# Altium footprint library Footprint-Lib-PhilsLab.PcbLib: 351 footprints (part 17 of 22)
Each footprint in its own frame and in the unit in brackets; x right, y up, seen from the top. Pads: shape width x height; smd on the part's side, far side on the other; paste and mask are expansions set on the pad; w line width, h text height; cw(c..) or ccw(c..) is an arc to the next point about the centre after c.
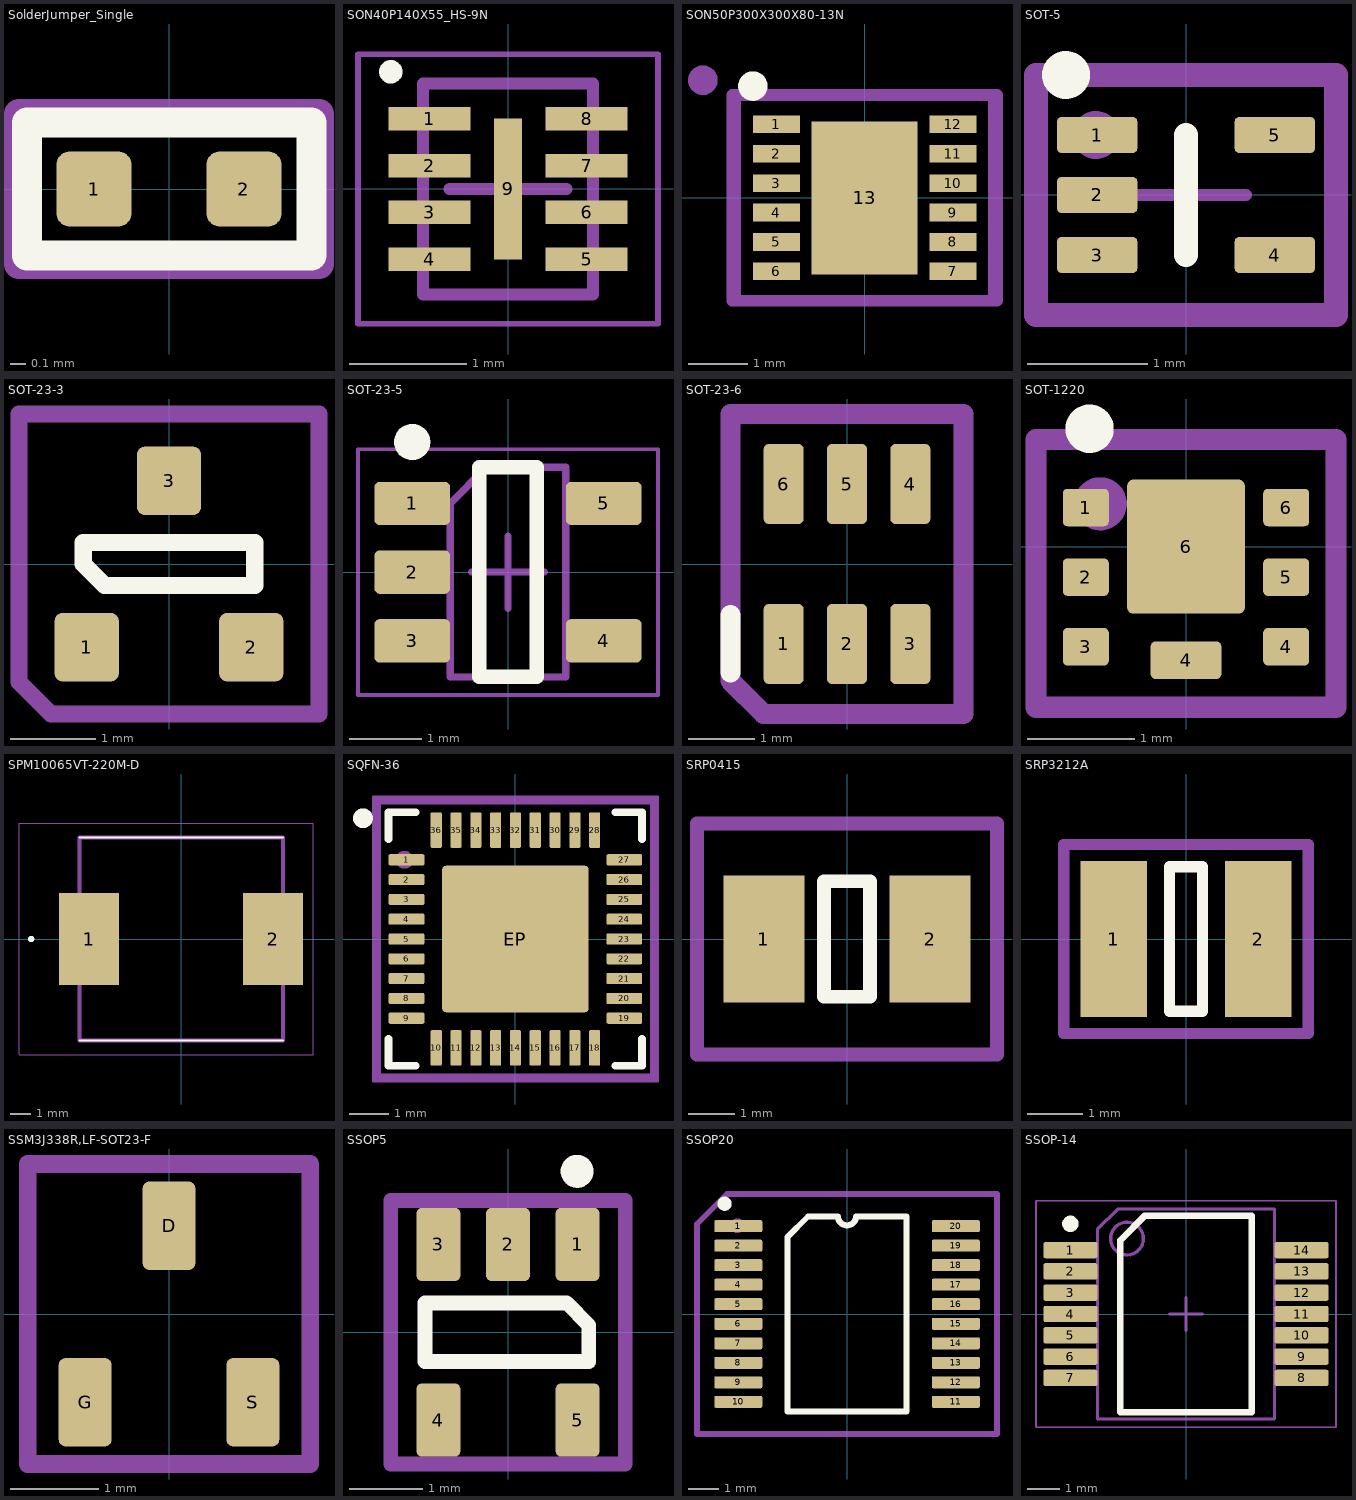
[diagram p16: the footprints below, top view; thin cyan lines are the x and y axes]

## SolderJumper_Single [mm]
pads (2):
  rrect35% 0.5x0.5 smd mask+0: 1(-0.5,0) 2(0.5,0)
Top Overlay:
  lines w0.2: -0.948,-0.444 0.95,-0.444 0.95,0.444 -0.948,0.444 -0.948,0.048 -0.948,-0.444
Top Solder:
  region: -0.5,0.25 0.5,0.25 0.5,-0.25 -0.5,-0.25
Mechanical 13:
  lines w0.2: -1,-0.5 -1,0.5 1,0.5 1,-0.5 -1,-0.5
  text "'.Designator'" at -5.84,-0.925 h1

## SON40P140X55_HS-9N [mm] "SON, 8-Leads, Body 1,70x1,35mm, Pitch 0,40mm, Thermal Pad 1,20x0,24mm, IPC Medium Density"
height 0.55
pads (9):
  rect 0.7x0.2 smd mask+0.05: 1(-0.67,0.6) 2(-0.67,0.2) 3(-0.67,-0.2) 4(-0.67,-0.6) 5(0.67,-0.6) 6(0.67,-0.2) 7(0.67,0.2) 8(0.67,0.6)
  rect 0.24x1.2 smd mask+0.05: 9(0,0)
Top Overlay:
  circle w0.1: c-1,1 r0.05
Mechanical 13:
  lines w0.1: -0.725,-0.9 -0.725,0.9 0.725,0.9 0.725,-0.9 -0.725,-0.9
  text "'.Designator'" at -5.84,-0.925 h1
Mechanical 15:
  lines w0.05: -1.28,-1.15 -1.28,1.15 1.28,1.15 1.28,-1.15 -1.28,-1.15
  lines w0.1: -0.5,0 0.5,0 ; 0,-0.5 0,0.5
3D body "SON40P140X55_HS-9N.step": height 0.55, standoff 0, extent -0.726,-0.9 0.726,0.9

## SON50P300X300X80-13N [mm]
pads (13):
  rect 0.8x0.3 smd: 1(-1.5,1.25) 2(-1.5,0.75) 3(-1.5,0.25) 4(-1.5,-0.25) 5(-1.5,-0.75) 6(-1.5,-1.25) 7(1.5,-1.25) 8(1.5,-0.75) 9(1.5,-0.25) 10(1.5,0.25) 11(1.5,0.75) 12(1.5,1.25)
  rect 1.8x2.6 smd: 13(0,0)
Top Overlay:
  circle w0.25: c-1.9,1.9 r0.125
Mechanical 13:
  circle w0.3: c-2.75,2 r0.1
  lines w0.2: -2.25,-1.75 -2.25,1.75 2.25,1.75 2.25,-1.75 -2.25,-1.75
  text "'.Designator'" at -5.815,-0.9 h1
Mechanical 15:
  lines w0.05: -2.125,-1.8 -2.125,1.8 2.125,1.8 2.125,-1.8 -2.125,-1.8
3D body "MAX17577ATC+.stp": height 0.8, standoff 0, extent -1.55,-1.5 1.55,1.5

## SOT-5 [mm] "SOT, 5-Leads, Body 1.60x1.60mm, Pitch 0.50mm, IPC Medium Density"
height 0.6
pads (5):
  rrect25% 0.67x0.3 smd mask+0.05: 1(-0.74,0.5) 2(-0.74,0) 3(-0.74,-0.5) 4(0.74,-0.5) 5(0.74,0.5)
Top Overlay:
  circle w0.2: c-1,1 r0.1
  lines w0.2: 0,-0.5 0,0.5
Mechanical 13:
  circle w0.2: c-0.75,0.5 r0.1
  lines w0.2: -1.25,-1 -1.25,1 1.25,1 1.25,-1 -1.25,-1
Mechanical 15:
  lines w0.05: -1.225,-1 -1.225,1 1.225,1 1.225,-1 -1.225,-1
  lines w0.1: -0.5,0 0.5,0 ; 0,-0.5 0,0.5
3D body "SOT-5.step": height 0.6, standoff 0, extent -0.8,-0.848 0.8,0.848

## SOT-23-3 [mm]
pads (3):
  rrect25% 0.75x0.8 smd: 1(-0.96,-0.97) 2(0.96,-0.97) 3(0,0.97)
Top Overlay:
  lines w0.2: -1,0 -0.75,-0.25 1,-0.25 1,0.25 -1,0.25 -1,0
Mechanical 13:
  lines w0.2: -1.75,-1.377 -1.75,1.75 1.75,1.75 1.75,-1.75 -1.377,-1.75 -1.75,-1.377
  text "'.Designator'" at -5.84,-0.925 h1
3D body "SOT-23-3.stp": height 1.01, standoff 0.01, extent -1.45,-1.15 1.45,1.15

## SOT-23-5 [mm] "SOT23, 5-Leads, Body 2,90x2,80mm, Pitch 0,95mm, IPC Medium Density"
height 1.45
pads (5):
  rrect25% 1.05x0.6 smd: 1(-1.325,0.95) 2(-1.325,0) 3(-1.325,-0.95) 4(1.325,-0.95) 5(1.325,0.95)
Top Overlay:
  circle w0.25: c-1.325,1.8 r0.125
  lines w0.2: -0.4,-1.45 -0.4,1.45 0.4,1.45 0.4,-1.45 -0.4,-1.45
Mechanical 13:
  lines w0.1: -0.8,-1.45 0.8,-1.45 0.8,1.45 -0.3,1.45 -0.8,0.95 -0.8,-1.45
Mechanical 15:
  lines w0.05: -2.075,-1.7 2.075,-1.7 2.075,1.7 -2.075,1.7 -2.075,-1.7
  lines w0.1: -0.5,0 0.5,0 ; 0,-0.5 0,0.5
3D body "SOT95P280X145-5N.step": height 1.45, standoff 0, extent -1.4,-1.45 1.4,1.45

## SOT-23-6 [mm]
pads (6):
  rrect25% 0.6x1.2 smd: 1(-0.95,-1.2) 2(0,-1.2) 3(0.95,-1.2) 4(0.95,1.2) 5(0,1.2) 6(-0.95,1.2)
Top Overlay:
  lines w0.3: -1.75,-1.628 -1.75,-0.761
Mechanical 13:
  lines w0.3: -1.75,-1.75 -1.75,0 -1.75,2.25 1.75,2.25 1.75,-2.25 -1.25,-2.25 -1.75,-1.75
  text "'.Designator'" at -5.84,-0.925 h1
3D body "SOT23-6.step": height 1.45, standoff 0, extent -1.45,-1.4 1.45,1.4

## SOT-1220 [mm]
pads (8):
  rrect25% 0.43x0.35 smd mask+0.05: 1(-0.935,0.365) 2(-0.935,-0.285) 3(-0.935,-0.935) 4(0.935,-0.935) 5(0.935,-0.285) 6(0.935,0.365)
  rrect25% 0.66x0.35 smd mask+0.12: 4(0,-1.06)
  rrect10% 1.1x1.25 smd mask+0.18: 6(0,0)
Top Overlay:
  circle w0.3: c-0.9,1.1 r0.075
Mechanical 13:
  circle w0.3: c-0.8,0.4 r0.097
  lines w0.2: -1.4,-1.5 -1.4,1 1.4,1 1.4,-1.5 -1.4,-1.5
  text ".Designator" at -4.998,-0.333 h1
3D body "SOT-1220-UDFN6B.STEP": height 0.61, standoff 0.01, extent -1,-1.287 1,0.713

## SPM10065VT-220M-D [mm]
pads (2):
  rect 2.95x4.5 smd: 1(-4.525,0) 2(4.525,0)
Top Overlay:
  circle w0.2: c-7.375,0 r0.05
  lines w0.1: -5,-5 5,-5 ; -5,5 5,5
Mechanical 13:
  lines w0.2: -5,-5 -5,5 5,5 5,-5 -5,-5
  text "'.Designator'" at -5.84,-0.925 h1
Mechanical 15:
  lines w0.05: -7.975,-5.7 -7.975,5.7 6.5,5.7 6.5,-5.7 -7.975,-5.7
3D body "SPM10065VT-220M-D.stp": height 6.36, standoff 0.01, extent -5.25,-5 5.25,5

## SQFN-36 [mm]
height 1
pads (37):
  rrect25% 0.9x0.28 smd mask+0.05: 1(-2.75,2) 2(-2.75,1.5) 3(-2.75,1) 4(-2.75,0.5) 5(-2.75,0) 6(-2.75,-0.5) 7(-2.75,-1) 8(-2.75,-1.5) 9(-2.75,-2) 19(2.75,-2) 20(2.75,-1.5) 21(2.75,-1) 22(2.75,-0.5) 23(2.75,0) 24(2.75,0.5) 25(2.75,1) 26(2.75,1.5) 27(2.75,2)
  rrect25% 0.28x0.9 smd mask+0.05: 10(-2,-2.75) 11(-1.5,-2.75) 12(-1,-2.75) 13(-0.5,-2.75) 14(0,-2.75) 15(0.5,-2.75) 16(1,-2.75) 17(1.5,-2.75) 18(2,-2.75) 28(2,2.75) 29(1.5,2.75) 30(1,2.75) 31(0.5,2.75) 32(0,2.75) 33(-0.5,2.75) 34(-1,2.75) 35(-1.5,2.75) 36(-2,2.75)
  rrect5% 3.7x3.7 smd: EP(0,0)
Top Overlay:
  circle w0.25: c-3.85,3.05 r0.125
  lines w0.2: -3.2,-2.525 -3.2,-3.2 -2.525,-3.2 ; -3.2,2.525 -3.2,3.2 -2.525,3.2 ; 2.525,-3.2 3.2,-3.2 3.2,-2.525 ; 2.525,3.2 3.2,3.2 3.2,2.525
Mechanical 13:
  circle w0.25: c-2.8,2 r0.1
  lines w0.2: -3.5,-3.5 -3.5,3.5 3.5,3.5 3.5,-3.5 -3.5,-3.5
  text "'.Designator'" at -5.665,-0.417 h1
Mechanical 15:
  lines w0.05: -3.6,-3.6 -3.6,3.6 3.6,3.6 3.6,-3.6 -3.6,-3.6
  lines w0.1: -0.5,0 0.5,0 ; 0,-0.5 0,0.5
3D body "SQFN-36.step": height 1, standoff 0, extent -3.051,-3.051 3.051,3.051

## SRP0415 [mm]
pads (2):
  rect 1.75x2.75 smd: 1(-1.8,0) 2(1.8,0)
Top Overlay:
  lines w0.3: -0.5,-1.25 -0.5,1.25 0.5,1.25 0.5,-1.25 -0.5,-1.25
Mechanical 13:
  lines w0.3: -3.25,-2.5 -3.25,2.5 3.25,2.5 3.25,-2.5 -3.25,-2.5
  text "'.Designator'" at -5.84,-0.925 h1
3D body "SRP0415.stp": height 1.55, standoff 0.05, extent -2.205,-2.05 2.205,2.051

## SRP3212A [mm]
pads (2):
  rect 1.2x2.8 smd: 1(-1.3,0) 2(1.3,0)
Top Overlay:
  lines w0.2: -0.3,-1.3 -0.3,1.3 0.3,1.3 0.3,-1.3 -0.3,-1.3
Mechanical 13:
  lines w0.2: -2.2,-1.7 2.2,-1.7 2.2,1.7 -2.2,1.7 -2.2,-1.7
  text "'.Designator'" at -5.665,-0.417 h1
3D body "SRP3212A.stp": height 1.15, standoff 0.01, extent -1.61,-1.26 1.61,1.26

## SSM3J338R,LF-SOT23-F [mm]
pads (3):
  rrect25% 0.6x1 smd: D(0,1) G(-0.95,-1) S(0.95,-1)
Mechanical 13:
  lines w0.2: -1.6,-1.7 -1.6,1.7 1.6,1.7 1.6,-1.7 -1.6,-1.7
  text "'.Designator'" at -5.84,-0.925 h1
3D body "SOT-23F.STEP": height 0.91, standoff 0, extent -1.45,-1.2 1.45,1.2

## SSOP5 [mm]
pads (5):
  rrect25% 0.6x1 smd: 1(0.95,1.2) 2(0,1.2) 3(-0.95,1.2) 4(-0.95,-1.2) 5(0.95,-1.2)
Top Overlay:
  circle w0.25: c0.944,2.199 r0.1
  lines w0.2: -1.134,-0.4 -1.134,0.4 0.8,0.4 1.104,0.096 1.104,-0.4 -1.134,-0.4
Mechanical 13:
  circle w0.25: c0.962,1.225 r0.1
  lines w0.2: -1.6,-1.8 -1.6,-0.4 -1.6,1.8 1.6,1.8 1.6,-1.8 -1.6,-1.8
  text "'.Designator'" at -5.84,-0.925 h1
3D body "SSOP5.stp": height 1.12, standoff 0, extent -1.45,-1.4 1.45,1.4

## SSOP20 [mm]
pads (20):
  rrect25% 1.6x0.4 smd mask+0.07: 1(-3.625,2.925) 2(-3.625,2.275) 3(-3.625,1.625) 4(-3.625,0.975) 5(-3.625,0.325) 6(-3.625,-0.325) 7(-3.625,-0.975) 8(-3.625,-1.625) 9(-3.625,-2.275) 10(-3.625,-2.925) 11(3.625,-2.925) 12(3.625,-2.275) 13(3.625,-1.625) 14(3.625,-0.975) 15(3.625,-0.325) 16(3.625,0.325) 17(3.625,0.975) 18(3.625,1.625) 19(3.625,2.275) 20(3.625,2.925)
Top Overlay:
  circle w0.25: c-4.079,3.677 r0.112
  lines w0.2: -1.99,-3.25 -1.99,2.56 -1.3,3.25 -0.3,3.25 ccw(c0,3.25) 0.3,3.25 1.99,3.25 1.99,-3.25 -1.99,-3.25
Mechanical 13:
  circle w0.25: c-3.66,2.943 r0.117
  lines w0.2: -5,-4 5,-4 5,4 -4,4 -5,3 -5,-4
  text "'.Designator'" at -5.84,-0.925 h1
3D body "SSOP20.step": height 1.85, standoff 0.01, extent -3.95,-3.63 3.95,3.67

## SSOP-14 [mm]
height 2
pads (14):
  rrect25% 1.65x0.5 smd mask+0.15: 1(-3.525,1.95) 2(-3.525,1.3) 3(-3.525,0.65) 4(-3.525,0) 5(-3.525,-0.65) 6(-3.525,-1.3) 7(-3.525,-1.95) 8(3.525,-1.95) 9(3.525,-1.3) 10(3.525,-0.65) 11(3.525,0) 12(3.525,0.65) 13(3.525,1.3) 14(3.525,1.95)
Top Overlay:
  circle w0.25: c-3.525,2.75 r0.125
  lines w0.2: -2,-3 -2,2.25 -1.25,3 2,3 2,-3 -2,-3
Mechanical 13:
  circle w0.1: c-1.8,2.3 r0.5
  lines w0.1: -2.7,-3.2 -2.7,2.579 -2.079,3.2 2.7,3.2 2.7,-3.2 -2.7,-3.2
  text "'.Designator'" at -6.315,-1.4 h1
Mechanical 15:
  lines w0.05: -4.575,-3.45 4.575,-3.45 4.575,3.45 -4.575,3.45 -4.575,-3.45
  lines w0.1: -0.5,0 0.5,0 ; 0,-0.5 0,0.5
3D body "SSOP-14.step": height 2, standoff 0, extent -3.875,-3.2 3.875,3.2